# Altium schematic symbol library Wuerth_Coil.SchLib: 1 symbol
Pins are listed as number, name and electrical type; pins without a type are passive.

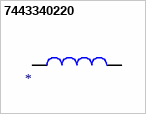
[diagram p0: symbol 7443340220]

## 7443340220
designator ?
Inductor; Manufacturer_Name: Wurth Elektronik; Manufacturer_Part_Number: 7443340220; Datasheet Link: https://www.we-online.com/components/products/download/3D_WE-HCC-8070_7443340xxx_3D+%28rev1%29.pdf; Height: 7.2mm; Mouser Part Number: 710-7443340220; Mouser Price/Stock: https://www.mouser.co.uk/ProductDetail/Wurth-Elektronik/7443340220?qs=MVRUG6Lt7nGtb48EAN9JeA%3D%3D
footprint WE-HCC_807021
pins: 1, 2